# Altium schematic symbol library Resistor.SchLib: 1085 symbols (part 28 of 29)
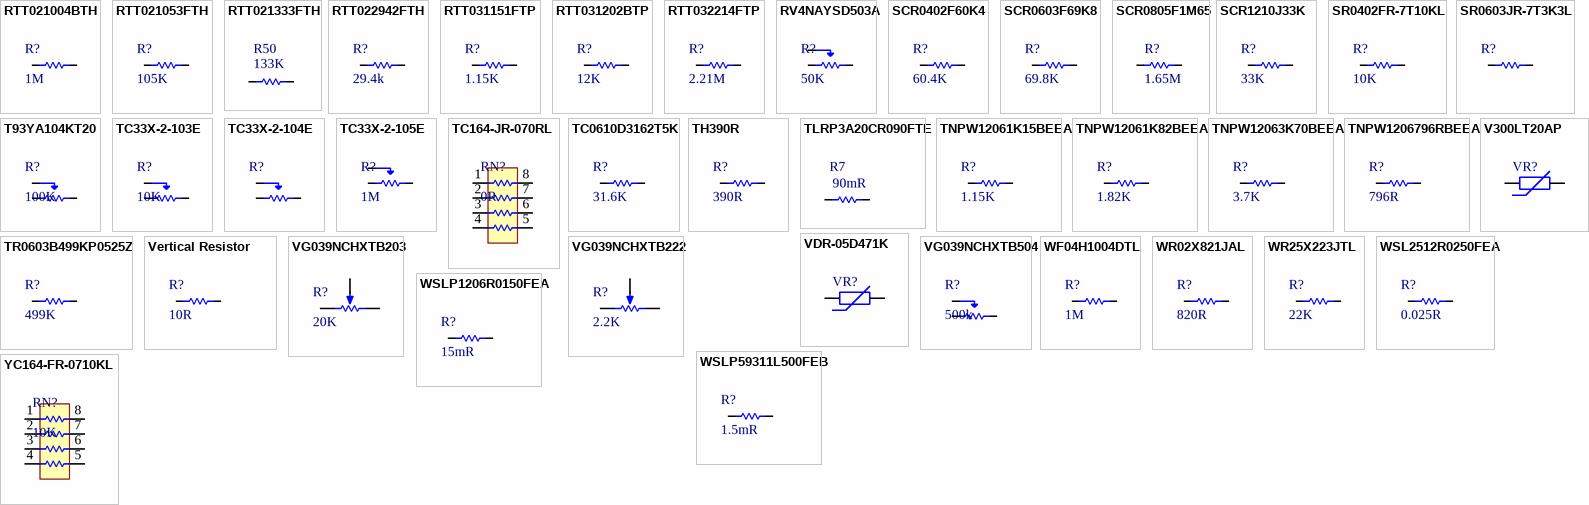
[diagram p54: symbols RTT021004BTH to YC164-FR-0710KL]

## RTT022942FTH
designator R?, comment 29.4k
62.5mW Thick Film Resistors 50V ±100ppm/℃ ±1% 29.4kΩ 0402 Chip Resistor - Surface Mount ROHS; Manufacturer: RALEC; Manufacturer Part Number: RTT022942FTH; Package: 0402; LCSC Part Number: C102950; Item Type: Resistor; ComponentLink1Description: LCSC; ComponentLink1URL: https://www.lcsc.com/product-detail/Chip-Resistor-Surface-Mount_RALEC-RTT022942FTH_C102950.html
footprint Res-0402
pins: 1, 2

## RTT031151FTP
designator R?, comment 1.15K
100mW Thick Film Resistors 75V ±100ppm/℃ ±1% 1.15kΩ 0603 Chip Resistor - Surface Mount ROHS; Manufacture Part Number: RTT031151FTP; Manufacturer: RALAC; Footprint: 0402; Value: 1.15K; ComponentLink1Description: JLC; ComponentLink1URL: https://jlcpcb.com/kr/partdetail/Ralec-RTT031151FTP/C103239; JLC Part Number: C103239; Item Type: Resistor
footprint Res-0402
pins: 1, 2

## RTT031202BTP
designator R?, comment 12K
12kΩ 0603 Chip Resistor - Surface Mount ROHS; Manufacturer: RALEC; Manufacturer Part Number: RTT031202BTP; Footprint: 0603; ComponentLink1Description: LCSC; ComponentLink1URL: https://lcsc.com/product-detail/Chip-span-style-background-color-ff0-Resistor-span-Surface-Mount_RALEC-RTT031202BTP_C2981490.html; LCSC Part Number: C2981490
footprint Res-0603
pins: 1, 2

## RTT032214FTP
designator R?, comment 2.21M
2.21MΩ ±1% 0.1W ±100ppm/℃ 0603 Chip Resistor - Surface Mount RoHS; Manufacturer: RALEC; Manufacturer Part Number: RTT032214FTP; Value: 2.21M; LCSC Part Number: C166858
footprint Res-0603
pins: 1, 2

## RV4NAYSD503A
designator R?, comment 50K
Potentiometer RV4 Series 1 Turn 50K Ohms 10% Tol Power 2W Slotted 0.875 In Shaft; Manufacturer: Precision Electronic Components; Manufacturer Part Number: RV4NAYSD503A; Value: 50kR; Number of Turns: 1; Voltage Rating (DC): 500V; Actuator Length: 0.875inch; Actuator Diameter: 0.249inch; Supplier: Digikey; Supplier Part Number: RV4N503C-ND; RoHS: Yes; Category: Variable Resistors and Potentiometers; Stock: 1093; Pricing: 1=18.17, 10=16.774, 25=16.0752, 50=13.9784, 100=12.5806, 250=10.83328, 500=10.4838, 1000=9.78488 (USD); Mounting Technology: Panel; Housing Material: Stainless Steel; Tolerance: 10%; Packaging: Bulk; Taper: Linear; Termination: Solder; Number of Gangs: 1; Resistor Type: Carbon; Package Quantity: 100; Max Power Dissipation: 2W; Series: RV4; Diameter: 28.4mm; Length: 13.6mm; Reach SVHC Compliant: Yes; Lead Free: Lead Free; ComponentLink1URL: https://datasheet.ciiva.com/2152/milstylerv4-2152739.pdf?src-supplier=Digikey; ComponentLink1Description: https://datasheet.ciiva.com/2152/milstylerv4-2152739.pdf?src-supplier=Digikey; Item Type: Potentiometer; Package: Custom
footprint RV4NAYSD503A
pins: 1, 2 CW, 3

## SCR0402F60K4
designator R?, comment 60.4K
60.4kΩ 50V 62.5mW Thick Film Resistors ±1% 0402 Chip Resistor - Surface Mount ROHS; Manufacturer: VO; Manufacturer Part Number: SCR0402F60K4; Package: 0402; LCSC Part Number: C3016055; Item Type: Resistor; ComponentLink1Description: LCSC; ComponentLink1URL: https://www.lcsc.com/product-detail/Chip-Resistor-Surface-Mount_VO-SCR0402F60K4_C3016055.html
footprint Res-0402
pins: 1, 2

## SCR0603F69K8
designator R?, comment 69.8K
100mW Thick Film Resistors 75V ±1% 69.8kΩ 0603 Chip Resistor - Surface Mount ROHS; Manufacturer: VO; Manufacturer Part Number: SCR0603F69K8; Package: 0603; LCSC Part Number: C3016381; Item Type: Resistor; ComponentLink1Description: LCSC; ComponentLink1URL: https://www.lcsc.com/product-detail/Chip-Resistor-Surface-Mount_VO-SCR0603F69K8_C3016381.html
footprint Res-0603
pins: 1, 2

## SCR0805F1M65
designator R?, comment 1.65M
125mW Thick Film Resistors 150V ±1% 1.65MΩ 0805 Chip Resistor - Surface Mount ROHS; Manufacturer: VO; Manufacturer Part Number: SCR0805F1M65; Package: 0805; LCSC Part Number: C3016615; Item Type: Resistor; ComponentLink1Description: LCSC; ComponentLink1URL: https://www.lcsc.com/product-detail/Chip-Resistor-Surface-Mount_VO-SCR0805F1M65_C3016615.html
footprint RES-0805 (SMD 0805)
pins: 1, 2

## SCR1210J33K
designator R?, comment 33K
RES 33K OHM ±5% 500mW Thick Film Resistors 200V 1210 Chip Resistor - Surface Mount ROHS; Manufacturer: VO; Manufacturer Part Number: SCR1210J33K; Package: 1210; LCSC Part Number: C3018222; Item Type: Resistor; ComponentLink1Description: LCSC; ComponentLink1URL: https://www.lcsc.com/product-detail/Chip-Resistor-Surface-Mount_VO-SCR1210J33K_C3018222.html
footprint Res_1210
pins: 1, 2

## SR0402FR-7T10KL
designator R?, comment 10K
RES 10K OHM 1% 1/5W 0402; Manufacturer: Yageo; Manufacturer Part Number: SR0402FR-7T10KL; Supplier 1: Digi-Key; Stock 1: 7859; Pricing 1: 1=0.56, 10=0.398, 100=0.2072, 1000=0.11156, 2500=0.10757, 5000=0.10598 (USD); RoHS Compliant: Yes; ComponentLink1URL: http://www.yageo.com/documents/recent/PYu-SR_D_F%20tol_RoHS_L_3.pdf?src-supplier=Digi-Key; ComponentLink1Description: http://www.yageo.com/documents/recent/PYu-SR_D_F%20tol_RoHS_L_3.pdf?src-supplier=Digi-Key; Supplier Part Number 1: YAG5815CT-ND; LCSC Part Number: C854480
footprint Res-0402
pins: 1, 2

## SR0603JR-7T3K3L
designator R?
250mW Thick Film Resistors 75V ±100ppm/℃ ±5% 3.3kΩ 0603 Chip Resistor - Surface Mount ROHS; Manufacturer: Yageo; Manufacturer Part Number: SR0603JR-7T3K3L; Supplier: Future Electronics; LCSC Part Number: C873727; RoHS: Yes; Item Type: Resistors; Stock: 10000; Pricing: 5000=0.0081, 15000=0.0078, 25000=0.0077, 100000=0.0074, 150000=0.0073 (USD); ComponentLink1Description: LCSC; ComponentLink1URL: https://www.lcsc.com/product-detail/Chip-Resistor-Surface-Mount_YAGEO-SR0603JR-7T3K3L_C873727.html
footprint Res-0603
pins: 1, 2

## T93YA104KT20
designator R?, comment 100K
TRIMMER 100K OHM 0.5W PC PIN TOP; Manufacturer: Vishay Sfernice; Manufacturer Part Number: T93YA104KT20; Item Type: Potensiometer; Value: 100kR; Tolerance: 10%; Power Rating: 500mW; Voltage Rating: 250V; Number of Turns: 21; Temperature Coefficient: 100ppm/°C; Supplier: Future Electronics; LCSC Part Number: C7061693; RoHS: Yes; Stock: 500; Pricing: 500=0.835, 1000=0.82, 1500=0.815, 2000=0.81, 2500=0.795 (USD); Mounting Technology: PCB,Through Hole; Min Operating Temperature: -55°C; Max Operating Temperature: 155°C; Packaging: Rail/Tube; Series: T93; Technology: CERMET; Package Quantity: 50; Resistor Type: Cermet; Taper: Linear; Termination: Pin; Max Power Dissipation: 500mW; Resistance Tolerance: 10%; Voltage Rating (AC): 250V; Length: 0.382inch; Width: 0.197inch; Height: 0.386inch; Depth: 5mm; Radiation Hardening: No; Lead Free: Lead Free; RoHS Compliant: Yes; Reach SVHC Compliant: Unknown; ComponentLink1URL: https://datasheet.ciiva.com/11831/0900766b80ed9ad6-11831453.pdf?src-supplier=Rs; ComponentLink1Description: https://datasheet.ciiva.com/11831/0900766b80ed9ad6-11831453.pdf?src-supplier=Rs; ComponentLink2URL: https://datasheet.ciiva.com/2156/t93-2156473.pdf?src-supplier=Digikey; ComponentLink2Description: https://datasheet.ciiva.com/2156/t93-2156473.pdf?src-supplier=Digikey; ComponentLink3URL: https://datasheet.ciiva.com/16367/t93-16367128.pdf?src-supplier=Future+Electronics; ComponentLink3Description: https://datasheet.ciiva.com/16367/t93-16367128.pdf?src-supplier=Future+Electronics
footprint T93YA104KT20
pins: 1 CCW, 2 Wiper, 3 CW

## TC33X-2-103E
designator R?, comment 10K
TRIMMER 10K OHM 0.1W J LEAD TOP; Manufacturer: Bourns; Manufacturer Part Number: TC33X-2-103E; Tolerance: 25%; Resistance: 10kR; Number of Turns: 1; Power Rating: 100mW; Temperature Coefficient: 250ppm/°C; Voltage Rating (DC): 50V; Item Type: Potentiometer; Supplier 1: Rs; RoHS: Yes; Category: Variable Resistors and Potentiometers; Stock 1: 950; Pricing 1: 500=0.24400, 1000=0.22000, 2000=0.19700, 4000=0.17300 (GBP); Mount: Surface Mount; Color: Silver; Weight: 29.4mg; Contact Plating: Copper,Tin,Silver; Min Operating Temperature: -40°C; Max Operating Temperature: 100°C; Packaging: Tape and Reel; Package Quantity: 1; Resistor Type: Cermet; Termination: Foot Print; Taper: Linear; Max Power Dissipation: 100mW; Series: TC33; Resistance Tolerance: 25%; Length: 3mm; Width: 0.118inch; Height: 0.047inch; Depth: 3.8mm; Radiation Hardening: No; Reach SVHC Compliant: Yes; Military Standard: Not; Lead Free: Lead Free; RoHS Compliant: Yes; ComponentLink1URL: https://datasheet.ciiva.com/11830/0900766b802749b3-11830705.pdf?src-supplier=Rs; ComponentLink1Description: https://datasheet.ciiva.com/11830/0900766b802749b3-11830705.pdf?src-supplier=Rs; ComponentLink2URL: https://datasheet.ciiva.com/7953/1818686-7953349.pdf?src-supplier=Element14; ComponentLink2Description: https://datasheet.ciiva.com/7953/1818686-7953349.pdf?src-supplier=Element14; ComponentLink3URL: https://datasheet.ciiva.com/26944/getdatasheetpartid-183773-26944166.pdf?src-supplier=Verical; ComponentLink3Description: https://datasheet.ciiva.com/26944/getdatasheetpartid-183773-26944166.pdf?src-supplier=Verical; ComponentLink4URL: https://datasheet.ciiva.com/2155/tc33-2155962.pdf?src-supplier=Digi-Key; ComponentLink4Description: https://datasheet.ciiva.com/2155/tc33-2155962.pdf?src-supplier=Digi-Key; ComponentLink5URL: https://datasheet.ciiva.com/2155/tc33-2155963.pdf?src-supplier=Digi-Key; ComponentLink5Description: https://datasheet.ciiva.com/2155/tc33-2155963.pdf?src-supplier=Digi-Key; ComponentLink6URL: https://datasheet.ciiva.com/2155/tc33-2155964.pdf?src-supplier=Digi-Key; ComponentLink6Description: https://datasheet.ciiva.com/2155/tc33-2155964.pdf?src-supplier=Digi-Key; ComponentLink7URL: https://datasheet.ciiva.com/8089/tc33-8089484.pdf?src-supplier=Avnet; ComponentLink7Description: https://datasheet.ciiva.com/8089/tc33-8089484.pdf?src-supplier=Avnet; ComponentLink8URL: https://datasheet.ciiva.com/28659/1520225-28659212.pdf?src-supplier=Element14; ComponentLink8Description: https://datasheet.ciiva.com/28659/1520225-28659212.pdf?src-supplier=Element14; Supplier Part Number 1: 4617135P; LCSC part Number: C719176
footprint TC33X-2-103E_
pins: 1 CCW, 2 Wiper, 3 CW

## TC33X-2-104E
designator R?
TRIMMER 100K OHM 0.1W J LEAD TOP; Manufacturer: Bourns; Manufacturer Part Number: TC33X-2-104E; Resistance: 100kR; Tolerance: 25%; Power Rating: 100mW; Number of Turns: 1; Temperature Coefficient: 250ppm/°C; Voltage Rating (DC): 50V; Item Type: Potentiometer; Supplier 1: Arrow Electronics; RoHS: Yes; Category: Variable Resistors and Potentiometers; Stock 1: 12500; Pricing 1: 2500=0.15500, 5000=0.13130 (USD); Mount: Surface Mount; Color: Silver; Weight: 29.4mg; Min Operating Temperature: -40°C; Max Operating Temperature: 100°C; Packaging: Tape and Reel; Package Quantity: 2500; Resistor Type: Carbon,Cermet; Termination: Foot Print; Max Power Dissipation: 100mW; Series: TC33; Resistance Tolerance: 25%; Length: 3mm; Width: 0.118inch; Height: 0.047inch; Depth: 3.8mm; Radiation Hardening: No; REACH SVHC: No SVHC; Military Standard: Not; RoHS Compliant: Yes; ComponentLink1URL: https://datasheet.ciiva.com/11832/0900766b802749b3-11832506.pdf?src-supplier=RSComponents; ComponentLink1Description: https://datasheet.ciiva.com/11832/0900766b802749b3-11832506.pdf?src-supplier=RSComponents; ComponentLink2URL: https://datasheet.ciiva.com/8700/tc33-8700395.pdf?src-supplier=Avnet; ComponentLink2Description: https://datasheet.ciiva.com/8700/tc33-8700395.pdf?src-supplier=Avnet; ComponentLink3URL: https://datasheet.ciiva.com/2155/tc33-2155965.pdf?src-supplier=Digi-Key; ComponentLink3Description: https://datasheet.ciiva.com/2155/tc33-2155965.pdf?src-supplier=Digi-Key; ComponentLink4URL: https://datasheet.ciiva.com/7953/1818686-7953181.pdf?src-supplier=Element14; ComponentLink4Description: https://datasheet.ciiva.com/7953/1818686-7953181.pdf?src-supplier=Element14; ComponentLink5URL: https://datasheet.ciiva.com/16716/70155234-16716301.pdf?src-supplier=Allied+Electronics; ComponentLink5Description: https://datasheet.ciiva.com/16716/70155234-16716301.pdf?src-supplier=Allied+Electronics; ComponentLink6URL: https://datasheet.ciiva.com/2155/tc33-2155966.pdf?src-supplier=Digi-Key; ComponentLink6Description: https://datasheet.ciiva.com/2155/tc33-2155966.pdf?src-supplier=Digi-Key; ComponentLink7URL: https://datasheet.ciiva.com/7953/1818686-7953182.pdf?src-supplier=Element14; ComponentLink7Description: https://datasheet.ciiva.com/7953/1818686-7953182.pdf?src-supplier=Element14; ComponentLink8URL: https://datasheet.ciiva.com/2155/tc33-2155967.pdf?src-supplier=Digi-Key; ComponentLink8Description: https://datasheet.ciiva.com/2155/tc33-2155967.pdf?src-supplier=Digi-Key; Supplier Part Number 1: TC33X-2-104E; LCSC Part Number: C719186
footprint TC33X-2-104E_
pins: 1 CCW, 2 Wiper, 3 CW

## TC33X-2-105E
designator R?, comment 1M
TRIMMER 1M OHM 0.1W J LEAD TOP; Manufacturer: Bourns; Manufacturer Part Number: TC33X-2-105E; Item Type: Variable Resistor; Supplier: Arrow Electronics; Supplier Part Number: TC33X-2-105E; RoHS: Yes; Category: Variable Resistors and Potentiometers; Stock: 5461; Pricing: 1=0.2738, 10=0.235, 25=0.2264, 100=0.2108, 250=0.2012, 500=0.1814, 1000=0.1356, 3000=0.126 (USD); ComponentLink1URL: https://datasheet.ciiva.com/6227/tc33-6227126.pdf?src-supplier=Digi-Key; ComponentLink1Description: https://datasheet.ciiva.com/6227/tc33-6227126.pdf?src-supplier=Digi-Key; ComponentLink2URL: https://datasheet.ciiva.com/43453/306tc33-43453797.pdf?src-supplier=Onlinecomponents.com; ComponentLink2Description: https://datasheet.ciiva.com/43453/306tc33-43453797.pdf?src-supplier=Onlinecomponents.com; LCSC Part Number: C5362465
footprint TC33X-2-105E
pins: 1 CCW, 2 Wiper, 3 CW

## TC164-JR-070RL
designator RN?, comment 0R
RES ARRAY 4 RES ZERO OHM 1206; Manufacturer: YAGEO; Manufacturer Part Number: TC164-JR-070RL; Item Type: Resistor; Package: 0603x4; LCSC Part Number: C1731008; ComponentLink1Description: LCSC; ComponentLink1URL: https://www.lcsc.com/product-detail/Resistor-Networks-Arrays_YAGEO-TC164-JR-070RL_C1731008.html
footprint 0603x4
pins: 1, 2, 3, 4, 5, 6, 7, 8

## TC0610D3162T5K
designator R?, comment 31.6K
333mW Thin Film Resistor 200V ±0.5% ±10ppm/℃ 31.6kΩ 1206 Chip Resistor - Surface Mount ROHS; Manufacturer: Uniroyal; Manufacturer Part Number: TC0610D3162T5K; Package: 1206; LCSC Part Number: C517800; Item Type: Resistor; ComponentLink1Description: LCSC; ComponentLink1URL: https://www.lcsc.com/product-detail/C517800.html
footprint Res-1206
pins: 1, 2

## TH390R
designator R?, comment 390R
Safety Resistor 390Ω 500mW ±350ppm/℃ ±5% Plugin Through Hole Resistors ROHS; Manufacturer: VO; Manufacturer Part Number: FR1/2W-390Ω±5%-2T52; Package: Plugin; LCSC Part Number: C601800; Item Type: Through Hole Resistor; ComponentLink1Description: LCSC; ComponentLink1URL: https://www.lcsc.com/product-detail/Through-Hole-Resistors_VO-FR1-2W-390-5-2T52_C601800.html
footprint TH390R
pins: 1, 2

## TLRP3A20CR090FTE
designator R7, comment 90mR
Res Current Sense Metal Strip 2512 0.09 Ohm 1% 2W ±25ppm/°C Molded Emboss T/R; Manufacturer: CGS; Manufacturer Part Number: TLRP3A20CR090FTE; Supplier: Digikey; Supplier Part Number: 1712-TLRP3A20CR090FTECT-ND; RoHS: No; Category: Chip SMD Resistors; Stock: 11268; Pricing: 1=0.57, 10=0.453, 25=0.4096, 50=0.3686, 100=0.3045, 250=0.28672, 500=0.23212, 1000=0.18775 (USD); Packaging: 10Packaging; Power Rating: 2W
footprint RES-2512
pins: 1, 2

## TNPW12061K15BEEA
designator R?, comment 1.15K
RES 1.15K OHM 0.1% 0.52W 1206; Manufacturer: Vishay; Manufacturer Part Number: TNPW12061K15BEEA; Item Type: Resistors; Max Power Dissipation: 250mW; Value: 1.15kΩ; Temperature Coefficient: 25ppm/°C; Voltage Rating: 200V; Supplier: DigiKey; LCSC Part Number: C1712792; RoHS: Compliant; Stock: 4975; Pricing: 1=0.41, 10=0.344, 25=0.3192, 50=0.3014, 100=0.2851, 250=0.2654, 500=0.25204, 1000=0.24 (USD); Case/Package: 1206; Case Code (Imperial): 1206; Case Code (Metric): 3216; China RoHS: Compliant; Composition: Thin Film; Contact Plating: Tin; Features: Anti-Sulfur, Automotive AEC-Q200, Moisture Resistant; Height: 550µm; Lead Free: Lead Free; Length: 3.2004mm; Lifecycle Status: Production; Max Operating Temperature: 125°C; Min Operating Temperature: -55°C; Mounting Technology: Surface Mount; Number of Terminals: 2; Number of Terminations: 2; Power Dissipation: 250mW; Power Rating: 250mW; Radiation Hardening: No; REACH SVHC: Yes; Termination: SMD/SMT; Tolerance: 0.1%; Width: 1.6mm; Working Voltage: 200V; ComponentLink1URL: https://datasheet.octopart.com:443/TNPW12061K15BEEA-Vishay-datasheet-182188515.pdf?src-supplier=IHS; ComponentLink1Description: https://datasheet.octopart.com:443/TNPW12061K15BEEA-Vishay-datasheet-182188515.pdf?src-supplier=IHS; ComponentLink2URL: https://datasheet.octopart.com:443/TNPW12061K15BEEA-Vishay-Dale-datasheet-182026744.pdf?src-supplier=IHS; ComponentLink2Description: https://datasheet.octopart.com:443/TNPW12061K15BEEA-Vishay-Dale-datasheet-182026744.pdf?src-supplier=IHS; ComponentLink3URL: https://datasheet.octopart.com/TNPW12061K15BEEA-Vishay-datasheet-13498837.pdf; ComponentLink3Description: https://datasheet.octopart.com/TNPW12061K15BEEA-Vishay-datasheet-13498837.pdf; ComponentLink4URL: https://datasheet.octopart.com/TNPW12061K15BEEA-Vishay-datasheet-13414878.pdf; ComponentLink4Description: https://datasheet.octopart.com/TNPW12061K15BEEA-Vishay-datasheet-13414878.pdf; ComponentLink5URL: https://datasheet.octopart.com/TNPW12061K15BEEA-Vishay-datasheet-13295955.pdf; ComponentLink5Description: https://datasheet.octopart.com/TNPW12061K15BEEA-Vishay-datasheet-13295955.pdf; ComponentLink6URL: https://datasheet.octopart.com/TNPW12061K15BEEA-Vishay-datasheet-13196373.pdf; ComponentLink6Description: https://datasheet.octopart.com/TNPW12061K15BEEA-Vishay-datasheet-13196373.pdf; ComponentLink7URL: https://datasheet.octopart.com/TNPW12061K15BEEA-Vishay-datasheet-13143890.pdf; ComponentLink7Description: https://datasheet.octopart.com/TNPW12061K15BEEA-Vishay-datasheet-13143890.pdf; ComponentLink8URL: https://datasheet.octopart.com/TNPW12061K15BEEA-Vishay-datasheet-13081780.pdf; ComponentLink8Description: https://datasheet.octopart.com/TNPW12061K15BEEA-Vishay-datasheet-13081780.pdf; ComponentLink9URL: https://datasheet.octopart.com/TNPW12061K15BEEA-Vishay-datasheet-13052401.pdf; ComponentLink9Description: https://datasheet.octopart.com/TNPW12061K15BEEA-Vishay-datasheet-13052401.pdf; ComponentLink10URL: https://datasheet.octopart.com/TNPW12061K15BEEA-Vishay-datasheet-13034137.pdf; ComponentLink10Description: https://datasheet.octopart.com/TNPW12061K15BEEA-Vishay-datasheet-13034137.pdf; ComponentLink11URL: https://datasheet.octopart.com/TNPW12061K15BEEA-Vishay-datasheet-12585086.pdf; ComponentLink11Description: https://datasheet.octopart.com/TNPW12061K15BEEA-Vishay-datasheet-12585086.pdf; ComponentLink12URL: https://datasheet.octopart.com/TNPW12061K15BEEA-Vishay-datasheet-12543131.pdf; ComponentLink12Description: https://datasheet.octopart.com/TNPW12061K15BEEA-Vishay-datasheet-12543131.pdf; ComponentLink13URL: https://datasheet.octopart.com/TNPW12061K15BEEA-Vishay-datasheet-12532511.pdf; ComponentLink13Description: https://datasheet.octopart.com/TNPW12061K15BEEA-Vishay-datasheet-12532511.pdf; ComponentLink14URL: https://datasheet.octopart.com/TNPW12061K15BEEA-Vishay-datasheet-12519971.pdf; ComponentLink14Description: https://datasheet.octopart.com/TNPW12061K15BEEA-Vishay-datasheet-12519971.pdf; ComponentLink15URL: https://datasheet.octopart.com/TNPW12061K15BEEA-Vishay-datasheet-12509767.pdf; ComponentLink15Description: https://datasheet.octopart.com/TNPW12061K15BEEA-Vishay-datasheet-12509767.pdf; ComponentLink16URL: https://datasheet.octopart.com/TNPW12061K15BEEA-Vishay-datasheet-12365287.pdf; ComponentLink16Description: https://datasheet.octopart.com/TNPW12061K15BEEA-Vishay-datasheet-12365287.pdf; ComponentLink17URL: https://datasheet.octopart.com/TNPW12061K15BEEA-Vishay-datasheet-10854096.pdf; ComponentLink17Description: https://datasheet.octopart.com/TNPW12061K15BEEA-Vishay-datasheet-10854096.pdf; ComponentLink18URL: https://datasheet.octopart.com/TNPW12061K15BEEA-Vishay-datasheet-10678752.pdf; ComponentLink18Description: https://datasheet.octopart.com/TNPW12061K15BEEA-Vishay-datasheet-10678752.pdf; ComponentLink19URL: https://datasheet.octopart.com/TNPW12061K15BEEA-Vishay-datasheet-10283461.pdf; ComponentLink19Description: https://datasheet.octopart.com/TNPW12061K15BEEA-Vishay-datasheet-10283461.pdf; ComponentLink20URL: https://datasheet.octopart.com/TNPW12061K15BEEA-Vishay-datasheet-10185418.pdf; ComponentLink20Description: https://datasheet.octopart.com/TNPW12061K15BEEA-Vishay-datasheet-10185418.pdf; ComponentLink21URL: https://datasheet.octopart.com/TNPW12061K15BEEA-Vishay-datasheet-10055244.pdf; ComponentLink21Description: https://datasheet.octopart.com/TNPW12061K15BEEA-Vishay-datasheet-10055244.pdf; ComponentLink22URL: http://sigma.octopart.com:80/rohs_statement/Vishay-company-15.pdf?src-supplier=Compliance+Statements; ComponentLink22Description: http://sigma.octopart.com:80/rohs_statement/Vishay-company-15.pdf?src-supplier=Compliance+Statements
footprint Res-1206
pins: 1, 2

## TNPW12061K82BEEA
designator R?, comment 1.82K
RES 1.82K OHM 0.1% 0.52W 1206; Manufacturer: Vishay; Manufacturer Part Number: TNPW12061K82BEEA; Item Type: Resistors; Max Power Dissipation: 250mW; Value: 1.82kΩ; Temperature Coefficient: 25ppm/°C; Voltage Rating: 200V; Supplier: DigiKey; LCSC Part Number: C2093281; RoHS: Compliant; Pricing: 5000=0.1931 (USD); Case/Package: 1206; Case Code (Imperial): 1206; Case Code (Metric): 3216; China RoHS: Compliant; Composition: Thin Film; Contact Plating: Tin; Features: Anti-Sulfur, Automotive AEC-Q200, Moisture Resistant; Height: 550µm; Length: 3.2004mm; Lifecycle Status: Production; Max Operating Temperature: 125°C; Min Operating Temperature: -55°C; Mounting Technology: Surface Mount; Number of Terminals: 2; Number of Terminations: 2; Power Dissipation: 250mW; Power Rating: 250mW; Radiation Hardening: No; REACH SVHC: Yes; Termination: SMD/SMT; Tolerance: 0.1%; Weight: 16.187578mg; Width: 1.6mm; Working Voltage: 200V; ComponentLink1URL: https://datasheet.octopart.com:443/TNPW12061K82BEEA-Vishay-datasheet-182188515.pdf?src-supplier=IHS; ComponentLink1Description: https://datasheet.octopart.com:443/TNPW12061K82BEEA-Vishay-datasheet-182188515.pdf?src-supplier=IHS; ComponentLink2URL: https://datasheet.octopart.com:443/TNPW12061K82BEEA-Vishay-Dale-datasheet-182026744.pdf?src-supplier=IHS; ComponentLink2Description: https://datasheet.octopart.com:443/TNPW12061K82BEEA-Vishay-Dale-datasheet-182026744.pdf?src-supplier=IHS; ComponentLink3URL: https://datasheet.octopart.com/TNPW12061K82BEEA-Vishay-datasheet-13498837.pdf; ComponentLink3Description: https://datasheet.octopart.com/TNPW12061K82BEEA-Vishay-datasheet-13498837.pdf; ComponentLink4URL: https://datasheet.octopart.com/TNPW12061K82BEEA-Vishay-datasheet-13414878.pdf; ComponentLink4Description: https://datasheet.octopart.com/TNPW12061K82BEEA-Vishay-datasheet-13414878.pdf; ComponentLink5URL: https://datasheet.octopart.com/TNPW12061K82BEEA-Vishay-datasheet-13295955.pdf; ComponentLink5Description: https://datasheet.octopart.com/TNPW12061K82BEEA-Vishay-datasheet-13295955.pdf; ComponentLink6URL: https://datasheet.octopart.com/TNPW12061K82BEEA-Vishay-datasheet-13196373.pdf; ComponentLink6Description: https://datasheet.octopart.com/TNPW12061K82BEEA-Vishay-datasheet-13196373.pdf; ComponentLink7URL: https://datasheet.octopart.com/TNPW12061K82BEEA-Vishay-datasheet-13143890.pdf; ComponentLink7Description: https://datasheet.octopart.com/TNPW12061K82BEEA-Vishay-datasheet-13143890.pdf; ComponentLink8URL: https://datasheet.octopart.com/TNPW12061K82BEEA-Vishay-datasheet-13081780.pdf; ComponentLink8Description: https://datasheet.octopart.com/TNPW12061K82BEEA-Vishay-datasheet-13081780.pdf; ComponentLink9URL: https://datasheet.octopart.com/TNPW12061K82BEEA-Vishay-datasheet-13052401.pdf; ComponentLink9Description: https://datasheet.octopart.com/TNPW12061K82BEEA-Vishay-datasheet-13052401.pdf; ComponentLink10URL: https://datasheet.octopart.com/TNPW12061K82BEEA-Vishay-datasheet-13034137.pdf; ComponentLink10Description: https://datasheet.octopart.com/TNPW12061K82BEEA-Vishay-datasheet-13034137.pdf; ComponentLink11URL: https://datasheet.octopart.com/TNPW12061K82BEEA-Vishay-datasheet-12585086.pdf; ComponentLink11Description: https://datasheet.octopart.com/TNPW12061K82BEEA-Vishay-datasheet-12585086.pdf; ComponentLink12URL: https://datasheet.octopart.com/TNPW12061K82BEEA-Vishay-datasheet-12543131.pdf; ComponentLink12Description: https://datasheet.octopart.com/TNPW12061K82BEEA-Vishay-datasheet-12543131.pdf; ComponentLink13URL: https://datasheet.octopart.com/TNPW12061K82BEEA-Vishay-datasheet-12532511.pdf; ComponentLink13Description: https://datasheet.octopart.com/TNPW12061K82BEEA-Vishay-datasheet-12532511.pdf; ComponentLink14URL: https://datasheet.octopart.com/TNPW12061K82BEEA-Vishay-datasheet-12519971.pdf; ComponentLink14Description: https://datasheet.octopart.com/TNPW12061K82BEEA-Vishay-datasheet-12519971.pdf; ComponentLink15URL: https://datasheet.octopart.com/TNPW12061K82BEEA-Vishay-datasheet-12509767.pdf; ComponentLink15Description: https://datasheet.octopart.com/TNPW12061K82BEEA-Vishay-datasheet-12509767.pdf; ComponentLink16URL: https://datasheet.octopart.com/TNPW12061K82BEEA-Vishay-datasheet-12365287.pdf; ComponentLink16Description: https://datasheet.octopart.com/TNPW12061K82BEEA-Vishay-datasheet-12365287.pdf; ComponentLink17URL: https://datasheet.octopart.com/TNPW12061K82BEEA-Vishay-datasheet-10854096.pdf; ComponentLink17Description: https://datasheet.octopart.com/TNPW12061K82BEEA-Vishay-datasheet-10854096.pdf; ComponentLink18URL: https://datasheet.octopart.com/TNPW12061K82BEEA-Vishay-datasheet-10678752.pdf; ComponentLink18Description: https://datasheet.octopart.com/TNPW12061K82BEEA-Vishay-datasheet-10678752.pdf; ComponentLink19URL: https://datasheet.octopart.com/TNPW12061K82BEEA-Vishay-datasheet-10283461.pdf; ComponentLink19Description: https://datasheet.octopart.com/TNPW12061K82BEEA-Vishay-datasheet-10283461.pdf; ComponentLink20URL: https://datasheet.octopart.com/TNPW12061K82BEEA-Vishay-datasheet-10185418.pdf; ComponentLink20Description: https://datasheet.octopart.com/TNPW12061K82BEEA-Vishay-datasheet-10185418.pdf; ComponentLink21URL: https://datasheet.octopart.com/TNPW12061K82BEEA-Vishay-datasheet-10055244.pdf; ComponentLink21Description: https://datasheet.octopart.com/TNPW12061K82BEEA-Vishay-datasheet-10055244.pdf; ComponentLink22URL: http://sigma.octopart.com:80/rohs_statement/Vishay-company-15.pdf?src-supplier=Compliance+Statements; ComponentLink22Description: http://sigma.octopart.com:80/rohs_statement/Vishay-company-15.pdf?src-supplier=Compliance+Statements
footprint Res-1206
pins: 1, 2

## TNPW12063K70BEEA
designator R?, comment 3.7K
RES 3.7K OHM 0.1% 0.52W 1206; Manufacturer: Vishay; Manufacturer Part Number: TNPW12063K70BEEA; Item Type: Resistors; Max Power Dissipation: 250mW; Value: 3.7kΩ; Temperature Coefficient: 25ppm/°C; Voltage Rating: 200V; Supplier: DigiKey; LCSC Part Number: C1714117; RoHS: Compliant; Pricing: 5000=0.1931 (USD); Case/Package: 1206; Case Code (Imperial): 1206; Case Code (Metric): 3216; China RoHS: Compliant; Composition: Thin Film; Contact Plating: Tin; Features: Anti-Sulfur, Automotive AEC-Q200, Moisture Resistant; Height: 550µm; Length: 3.2004mm; Lifecycle Status: Production; Max Operating Temperature: 125°C; Min Operating Temperature: -55°C; Mounting Technology: Surface Mount; Number of Terminals: 2; Number of Terminations: 2; Power Dissipation: 250mW; Power Rating: 250mW; Radiation Hardening: No; REACH SVHC: Yes; Termination: SMD/SMT; Tolerance: 0.1%; Width: 1.6mm; Working Voltage: 200V; ComponentLink1URL: https://datasheet.octopart.com:443/TNPW12063K70BEEA-Vishay-datasheet-182188515.pdf?src-supplier=IHS; ComponentLink1Description: https://datasheet.octopart.com:443/TNPW12063K70BEEA-Vishay-datasheet-182188515.pdf?src-supplier=IHS; ComponentLink2URL: https://datasheet.octopart.com:443/TNPW12063K70BEEA-Vishay-Dale-datasheet-182026744.pdf?src-supplier=IHS; ComponentLink2Description: https://datasheet.octopart.com:443/TNPW12063K70BEEA-Vishay-Dale-datasheet-182026744.pdf?src-supplier=IHS; ComponentLink3URL: https://datasheet.octopart.com:443/TNPW12063K70BEEA-Vishay-datasheet-79783896.pdf?src-supplier=Upverter; ComponentLink3Description: https://datasheet.octopart.com:443/TNPW12063K70BEEA-Vishay-datasheet-79783896.pdf?src-supplier=Upverter; ComponentLink4URL: https://datasheet.octopart.com/TNPW12063K70BEEA-Vishay-datasheet-13498837.pdf; ComponentLink4Description: https://datasheet.octopart.com/TNPW12063K70BEEA-Vishay-datasheet-13498837.pdf; ComponentLink5URL: https://datasheet.octopart.com/TNPW12063K70BEEA-Vishay-datasheet-13414878.pdf; ComponentLink5Description: https://datasheet.octopart.com/TNPW12063K70BEEA-Vishay-datasheet-13414878.pdf; ComponentLink6URL: https://datasheet.octopart.com/TNPW12063K70BEEA-Vishay-datasheet-13295955.pdf; ComponentLink6Description: https://datasheet.octopart.com/TNPW12063K70BEEA-Vishay-datasheet-13295955.pdf; ComponentLink7URL: https://datasheet.octopart.com/TNPW12063K70BEEA-Vishay-datasheet-13196373.pdf; ComponentLink7Description: https://datasheet.octopart.com/TNPW12063K70BEEA-Vishay-datasheet-13196373.pdf; ComponentLink8URL: https://datasheet.octopart.com/TNPW12063K70BEEA-Vishay-datasheet-13143890.pdf; ComponentLink8Description: https://datasheet.octopart.com/TNPW12063K70BEEA-Vishay-datasheet-13143890.pdf; ComponentLink9URL: https://datasheet.octopart.com/TNPW12063K70BEEA-Vishay-datasheet-13081780.pdf; ComponentLink9Description: https://datasheet.octopart.com/TNPW12063K70BEEA-Vishay-datasheet-13081780.pdf; ComponentLink10URL: https://datasheet.octopart.com/TNPW12063K70BEEA-Vishay-datasheet-13052401.pdf; ComponentLink10Description: https://datasheet.octopart.com/TNPW12063K70BEEA-Vishay-datasheet-13052401.pdf; ComponentLink11URL: https://datasheet.octopart.com/TNPW12063K70BEEA-Vishay-datasheet-13034137.pdf; ComponentLink11Description: https://datasheet.octopart.com/TNPW12063K70BEEA-Vishay-datasheet-13034137.pdf; ComponentLink12URL: https://datasheet.octopart.com/TNPW12063K70BEEA-Vishay-datasheet-12585086.pdf; ComponentLink12Description: https://datasheet.octopart.com/TNPW12063K70BEEA-Vishay-datasheet-12585086.pdf; ComponentLink13URL: https://datasheet.octopart.com/TNPW12063K70BEEA-Vishay-datasheet-12543131.pdf; ComponentLink13Description: https://datasheet.octopart.com/TNPW12063K70BEEA-Vishay-datasheet-12543131.pdf; ComponentLink14URL: https://datasheet.octopart.com/TNPW12063K70BEEA-Vishay-datasheet-12532511.pdf; ComponentLink14Description: https://datasheet.octopart.com/TNPW12063K70BEEA-Vishay-datasheet-12532511.pdf; ComponentLink15URL: https://datasheet.octopart.com/TNPW12063K70BEEA-Vishay-datasheet-12519971.pdf; ComponentLink15Description: https://datasheet.octopart.com/TNPW12063K70BEEA-Vishay-datasheet-12519971.pdf; ComponentLink16URL: https://datasheet.octopart.com/TNPW12063K70BEEA-Vishay-datasheet-12509767.pdf; ComponentLink16Description: https://datasheet.octopart.com/TNPW12063K70BEEA-Vishay-datasheet-12509767.pdf; ComponentLink17URL: https://datasheet.octopart.com/TNPW12063K70BEEA-Vishay-datasheet-12365287.pdf; ComponentLink17Description: https://datasheet.octopart.com/TNPW12063K70BEEA-Vishay-datasheet-12365287.pdf; ComponentLink18URL: https://datasheet.octopart.com/TNPW12063K70BEEA-Vishay-datasheet-10854096.pdf; ComponentLink18Description: https://datasheet.octopart.com/TNPW12063K70BEEA-Vishay-datasheet-10854096.pdf; ComponentLink19URL: https://datasheet.octopart.com/TNPW12063K70BEEA-Vishay-datasheet-10678752.pdf; ComponentLink19Description: https://datasheet.octopart.com/TNPW12063K70BEEA-Vishay-datasheet-10678752.pdf; ComponentLink20URL: https://datasheet.octopart.com/TNPW12063K70BEEA-Vishay-datasheet-10283461.pdf; ComponentLink20Description: https://datasheet.octopart.com/TNPW12063K70BEEA-Vishay-datasheet-10283461.pdf; ComponentLink21URL: https://datasheet.octopart.com/TNPW12063K70BEEA-Vishay-datasheet-10185418.pdf; ComponentLink21Description: https://datasheet.octopart.com/TNPW12063K70BEEA-Vishay-datasheet-10185418.pdf; ComponentLink22URL: https://datasheet.octopart.com/TNPW12063K70BEEA-Vishay-datasheet-10055244.pdf; ComponentLink22Description: https://datasheet.octopart.com/TNPW12063K70BEEA-Vishay-datasheet-10055244.pdf; ComponentLink23URL: http://sigma.octopart.com:80/rohs_statement/Vishay-company-15.pdf?src-supplier=Compliance+Statements; ComponentLink23Description: http://sigma.octopart.com:80/rohs_statement/Vishay-company-15.pdf?src-supplier=Compliance+Statements
footprint Res-1206
pins: 1, 2

## TNPW1206796RBEEA
designator R?, comment 796R
RES 796 OHM 0.1% 0.52W 1206; Manufacturer: Vishay; Manufacturer Part Number: TNPW1206796RBEEA; Item Type: Resistors; Max Power Dissipation: 250mW; Value: 796Ω; Temperature Coefficient: 25ppm/°C; Working Voltage: 200V; Supplier: DigiKey; LCSC Part Number: C1712588; RoHS: Compliant; Pricing: 5000=0.1931 (USD); Case/Package: 1206; China RoHS: Compliant; Composition: Thin Film; Contact Plating: Tin; Features: Anti-Sulfur, Automotive AEC-Q200, Moisture Resistant; Height: 550µm; Length: 3.2004mm; Lifecycle Status: Production; Max Operating Temperature: 125°C; Min Operating Temperature: -55°C; Mounting Technology: Surface Mount; Number of Terminals: 2; Number of Terminations: 2; Packaging: Tape & Reel; Power Dissipation: 250mW; Power Rating: 250mW; Radiation Hardening: No; REACH SVHC: Yes; Tolerance: 0.1%; Width: 1.6mm; ComponentLink1URL: https://datasheet.octopart.com:443/TNPW1206796RBEEA-Vishay-datasheet-182188515.pdf?src-supplier=IHS; ComponentLink1Description: https://datasheet.octopart.com:443/TNPW1206796RBEEA-Vishay-datasheet-182188515.pdf?src-supplier=IHS; ComponentLink2URL: https://datasheet.octopart.com:443/TNPW1206796RBEEA-Vishay-Dale-datasheet-182026744.pdf?src-supplier=IHS; ComponentLink2Description: https://datasheet.octopart.com:443/TNPW1206796RBEEA-Vishay-Dale-datasheet-182026744.pdf?src-supplier=IHS; ComponentLink3URL: https://datasheet.octopart.com/TNPW1206796RBEEA-Vishay-datasheet-13498837.pdf; ComponentLink3Description: https://datasheet.octopart.com/TNPW1206796RBEEA-Vishay-datasheet-13498837.pdf; ComponentLink4URL: https://datasheet.octopart.com/TNPW1206796RBEEA-Vishay-datasheet-13414878.pdf; ComponentLink4Description: https://datasheet.octopart.com/TNPW1206796RBEEA-Vishay-datasheet-13414878.pdf; ComponentLink5URL: https://datasheet.octopart.com/TNPW1206796RBEEA-Vishay-datasheet-13295955.pdf; ComponentLink5Description: https://datasheet.octopart.com/TNPW1206796RBEEA-Vishay-datasheet-13295955.pdf; ComponentLink6URL: https://datasheet.octopart.com/TNPW1206796RBEEA-Vishay-datasheet-13196373.pdf; ComponentLink6Description: https://datasheet.octopart.com/TNPW1206796RBEEA-Vishay-datasheet-13196373.pdf; ComponentLink7URL: https://datasheet.octopart.com/TNPW1206796RBEEA-Vishay-datasheet-13143890.pdf; ComponentLink7Description: https://datasheet.octopart.com/TNPW1206796RBEEA-Vishay-datasheet-13143890.pdf; ComponentLink8URL: https://datasheet.octopart.com/TNPW1206796RBEEA-Vishay-datasheet-13081780.pdf; ComponentLink8Description: https://datasheet.octopart.com/TNPW1206796RBEEA-Vishay-datasheet-13081780.pdf; ComponentLink9URL: https://datasheet.octopart.com/TNPW1206796RBEEA-Vishay-datasheet-13052401.pdf; ComponentLink9Description: https://datasheet.octopart.com/TNPW1206796RBEEA-Vishay-datasheet-13052401.pdf; ComponentLink10URL: https://datasheet.octopart.com/TNPW1206796RBEEA-Vishay-datasheet-13034137.pdf; ComponentLink10Description: https://datasheet.octopart.com/TNPW1206796RBEEA-Vishay-datasheet-13034137.pdf; ComponentLink11URL: https://datasheet.octopart.com/TNPW1206796RBEEA-Vishay-datasheet-12585086.pdf; ComponentLink11Description: https://datasheet.octopart.com/TNPW1206796RBEEA-Vishay-datasheet-12585086.pdf; ComponentLink12URL: https://datasheet.octopart.com/TNPW1206796RBEEA-Vishay-datasheet-12543131.pdf; ComponentLink12Description: https://datasheet.octopart.com/TNPW1206796RBEEA-Vishay-datasheet-12543131.pdf; ComponentLink13URL: https://datasheet.octopart.com/TNPW1206796RBEEA-Vishay-datasheet-12532511.pdf; ComponentLink13Description: https://datasheet.octopart.com/TNPW1206796RBEEA-Vishay-datasheet-12532511.pdf; ComponentLink14URL: https://datasheet.octopart.com/TNPW1206796RBEEA-Vishay-datasheet-12519971.pdf; ComponentLink14Description: https://datasheet.octopart.com/TNPW1206796RBEEA-Vishay-datasheet-12519971.pdf; ComponentLink15URL: https://datasheet.octopart.com/TNPW1206796RBEEA-Vishay-datasheet-12509767.pdf; ComponentLink15Description: https://datasheet.octopart.com/TNPW1206796RBEEA-Vishay-datasheet-12509767.pdf; ComponentLink16URL: https://datasheet.octopart.com/TNPW1206796RBEEA-Vishay-datasheet-12365287.pdf; ComponentLink16Description: https://datasheet.octopart.com/TNPW1206796RBEEA-Vishay-datasheet-12365287.pdf; ComponentLink17URL: https://datasheet.octopart.com/TNPW1206796RBEEA-Vishay-datasheet-10854096.pdf; ComponentLink17Description: https://datasheet.octopart.com/TNPW1206796RBEEA-Vishay-datasheet-10854096.pdf; ComponentLink18URL: https://datasheet.octopart.com/TNPW1206796RBEEA-Vishay-datasheet-10678752.pdf; ComponentLink18Description: https://datasheet.octopart.com/TNPW1206796RBEEA-Vishay-datasheet-10678752.pdf; ComponentLink19URL: https://datasheet.octopart.com/TNPW1206796RBEEA-Vishay-datasheet-10283461.pdf; ComponentLink19Description: https://datasheet.octopart.com/TNPW1206796RBEEA-Vishay-datasheet-10283461.pdf; ComponentLink20URL: https://datasheet.octopart.com/TNPW1206796RBEEA-Vishay-datasheet-10185418.pdf; ComponentLink20Description: https://datasheet.octopart.com/TNPW1206796RBEEA-Vishay-datasheet-10185418.pdf; ComponentLink21URL: https://datasheet.octopart.com/TNPW1206796RBEEA-Vishay-datasheet-10055244.pdf; ComponentLink21Description: https://datasheet.octopart.com/TNPW1206796RBEEA-Vishay-datasheet-10055244.pdf; ComponentLink22URL: http://sigma.octopart.com:80/rohs_statement/Vishay-company-15.pdf?src-supplier=Compliance+Statements; ComponentLink22Description: http://sigma.octopart.com:80/rohs_statement/Vishay-company-15.pdf?src-supplier=Compliance+Statements
footprint Res-1206
pins: 1, 2

## TR0603B499KP0525Z
designator R?, comment 499K
100mW Thin Film Resistor 75V ±25ppm/℃ ±0.1% 499kΩ 0603 Chip Resistor - Surface Mount ROHS; Manufacturer: Ever Ohms; Manufacturer Part Number: TR0603B499KP0525Z; Supplier: LCSC; LCSC Part Number: C149937; RoHS: No; Item Type: Resistor
footprint Res-0603
pins: 1, 2

## V300LT20AP
designator VR?
775V 405V 300V 470V Plugin Varistors ROHS; Manufacturer: Littelfuse; Manufacturer Part Number: V300LT20AP; Supplier: Digikey; LCSC Part Number: C179067; RoHS: Yes; Item Type: Varistors; Stock: 3169; Pricing: 1=0.45, 10=0.398, 25=0.3736, 100=0.3048 (USD); ComponentLink1URL: https://datasheet.ciiva.com/4541/littelfuse-mov-la-34212-4541978.pdf?src-supplier=Mouser; ComponentLink1Description: https://datasheet.ciiva.com/4541/littelfuse-mov-la-34212-4541978.pdf?src-supplier=Mouser; ComponentLink2URL: https://datasheet.ciiva.com/367/littelfuse-mov-la-367663.pdf?src-supplier=Digikey; ComponentLink2Description: https://datasheet.ciiva.com/367/littelfuse-mov-la-367663.pdf?src-supplier=Digikey
footprint V300LT20AP
pins: 1, 2

## VDR-05D471K
designator VR?
810V 385V 300V 423V~517V Plugin Varistors ROHS; Manufacturer: VDR Varistor; Manufacturer Part Number: VDR-05D471K; Package: Plugin; LCSC Part Number: C273543; Item Type: Varistors; ComponentLink1Description: LCSC; ComponentLink1URL: https://www.lcsc.com/product-detail/Varistors_VDR-span-style-background-color-ff0-Varistor-span-VDR-05D471K_C273543.html
footprint VDR-05D471K
pins: 1, 2

## Vertical Resistor
designator R?, comment 10R
Metal Oxide Resistors 10Ω 2W ±350ppm/℃ ±5% Plugin Through Hole Resistors ROHS; Manufacturer: VO; Manufacturer Part Number: MO2WS-10Ω±5%-6T63; Package: Plugin; LCSC Part Number: C601001; Item Type: Through Hole Resistor; ComponentLink1Description: LCSC; ComponentLink1URL: https://www.lcsc.com/product-detail/Through-Hole-Resistors_VO-MO2WS-10-5-6T63_C601001.html
footprint MO2WS Vertical Type
pins: 1, 2

## VG039NCHXTB203
designator R?, comment 20K
±25% 20kΩ SMD Variable Resistors/Potentiometers ROHS; Manufacturer: HDK(Hokuriku Elec Industry); Manufacturer Part Number: VG039NCHXTB203; Package: SMD; LCSC Part Number: C128550; Item Type: Potentiometer; ComponentLink1Description: LCSC; ComponentLink1URL: https://www.lcsc.com/product-detail/Variable-Resistors-Potentiometers_HDK-Hokuriku-Elec-Industry-VG039NCHXTB203_C128550.html
footprint VG039NCHXTB203
pins: 1, 2, 3

## VG039NCHXTB222
designator R?, comment 2.2K
2.2kΩ SMD Variable Resistors/Potentiometers ROHS; Manufacturer: HDK; Manufacturer Part Number: VG039NCHXTB222; ComponentLink1Description: LCSC; ComponentLink1URL: https://lcsc.com/product-detail/Variable-Resistors-Potentiometers_HDK-Hokuriku-Elec-Industry-VG039NCHXTB222_C145162.html; Package: SMD; LCSC Part Number: C145162; Item Type: Resistor
footprint VG039NCHXTB222_
pins: 1, 2, 3

## VG039NCHXTB504
designator R?, comment 500k
±25% 500kΩ SMD Variable Resistors/Potentiometers ROHS; Manufacturer: HDK; Manufacturer Part Number: VG039NCHXTB504; LCSC Part Number: C128558; Item Type: Potentiometer; ComponentLink1Description: LCSC; ComponentLink1URL: https://www.lcsc.com/product-detail/Variable-Resistors-Potentiometers_HDK-Hokuriku-Elec-Industry-VG039NCHXTB504_C128558.html; Value: 500k
footprint VG039NCHXTB504_
pins: 1 CCW, 2 Wiper, 3 CW

## WF04H1004DTL
designator R?, comment 1M
125mW ±100ppm/℃ ±0.5% 1MΩ 0402 Chip Resistor - Surface Mount ROHS; Manufacturer Part Number: WF04H1004DTL; Manuacturer: Walsin Tech Crop; Package: 0402; Value: 1M; LCSC Part Number: C305257; ComponentLink1Description: LCSC; ComponentLink1URL: https://www.lcsc.com/product-detail/Chip-Resistor-Surface-Mount_Walsin-Tech-Corp-WF04H1004DTL_C305257.html
footprint Res-0402
pins: 1, 2

## WR02X821JAL
designator R?, comment 820R
50mW Thick Film Resistors ±200ppm/℃ ±5% 820Ω 0201 Chip Resistor - Surface Mount ROHS; Manufacturer: Walsin Tech Corp; Manufacturer Part Number: WR02X821JAL; Package: 0201; LCSC Part Number: C180347; Item Type: Resistor; ComponentLink1Description: LCSC; ComponentLink1URL: https://www.lcsc.com/product-detail/Chip-Resistor-Surface-Mount_Walsin-Tech-Corp-WR02X821JAL_C180347.html
footprint Res-0201
pins: 1, 2

## WR25X223JTL
designator R?, comment 22K
1W 250V ±100ppm/℃ ±5% 22kΩ 2512 Chip Resistor - Surface Mount ROHS; Manufacturer: Walsin Tech Corp; Manufacturer Part Number: WR25X223JTL; Package: 2512; LCSC Part Number: C396242; Item Type: Resistor; ComponentLink1Description: LCSC; ComponentLink1URL: https://www.lcsc.com/product-detail/Chip-Resistor-Surface-Mount_Walsin-Tech-Corp-WR25X223JTL_C396242.html
footprint RES-2512
pins: 1, 2

## WSL2512R0250FEA
designator R?, comment 0.025R
RES 0.025 OHM 1% 1W 2512; Manufacturer: Vishay Dale; Manufacturer Part Number: WSL2512R0250FEA; Item Type: Resistor; Value: 25mR; Voltage Rating: 150mV; Temperature Coefficient: 75ppm/°C; Supplier: Mouser; Supplier Part Number: 71-WSL2512R0250FEA; RoHS: No; Stock: 279245; Pricing: 1=0.58, 10=0.371, 50=0.371, 100=0.289, 1000=0.267, 10000=0.267 (USD); Case/Package: 2512; Pins: 2; Weight: 0.002243oz; Case Code (Imperial): 2512; Case Code (Metric): 6432; Contact Plating: Tin,Matte; Min Operating Temperature: -65°C; Max Operating Temperature: 170°C; Tolerance: 1%; Power Rating: 1W; Packaging: Tape and Reel; Package Quantity: 2000; Termination: SMD/SMT; Resistor Type: Metal Strip; Features: Moisture Resistant,Automotive AEC-Q200,Anti-Sulfur; Series: WSL; Max Power Dissipation: 1W; Number of Terminations: 2; Resistance Tolerance: 1%; Technology: METAL STRIP; Length: 6.4mm; Width: 3.2mm; Height: 0.635mm; Depth: 3.18mm; Radiation Hardening: No; Reach SVHC Compliant: No; Lead Free: Lead Free; RoHS Compliant: No; ComponentLink1URL: https://datasheet.ciiva.com/11811/0900766b80d81e3e-11811295.pdf?src-supplier=Rs; ComponentLink1Description: https://datasheet.ciiva.com/11811/0900766b80d81e3e-11811295.pdf?src-supplier=Rs; ComponentLink2URL: https://datasheet.ciiva.com/6088/wsl-6088905.pdf?src-supplier=Farnell; ComponentLink2Description: https://datasheet.ciiva.com/6088/wsl-6088905.pdf?src-supplier=Farnell; ComponentLink3URL: https://datasheet.ciiva.com/9024/wsl-9024744.pdf?src-supplier=Avnet; ComponentLink3Description: https://datasheet.ciiva.com/9024/wsl-9024744.pdf?src-supplier=Avnet; ComponentLink4URL: https://datasheet.ciiva.com/22675/wsl-22675150.pdf?src-supplier=Element14; ComponentLink4Description: https://datasheet.ciiva.com/22675/wsl-22675150.pdf?src-supplier=Element14; ComponentLink5URL: https://datasheet.ciiva.com/16768/70201098-16768106.pdf?src-supplier=Allied+Electronics; ComponentLink5Description: https://datasheet.ciiva.com/16768/70201098-16768106.pdf?src-supplier=Allied+Electronics; ComponentLink6URL: https://datasheet.ciiva.com/7702/442550-7702460.pdf?src-supplier=Element14; ComponentLink6Description: https://datasheet.ciiva.com/7702/442550-7702460.pdf?src-supplier=Element14; ComponentLink7URL: https://datasheet.ciiva.com/7702/442550-7702461.pdf?src-supplier=Element14; ComponentLink7Description: https://datasheet.ciiva.com/7702/442550-7702461.pdf?src-supplier=Element14; ComponentLink8URL: https://datasheet.ciiva.com/9024/wsl-9024767.pdf?src-supplier=Avnet; ComponentLink8Description: https://datasheet.ciiva.com/9024/wsl-9024767.pdf?src-supplier=Avnet
footprint RES-2512
pins: 1, 2

## WSLP1206R0150FEA
designator R?, comment 15mR
RES 0.015 OHM 1% 1W 1206; Manufacturer: Vishay Dale; Manufacturer Part Number: WSLP1206R0150FEA; Item Type: Resistor; Supplier: Mouser; LCSC Part Number: C844911; RoHS: Yes; Stock: 4766; Pricing: 1=0.68, 10=0.436, 50=0.436, 100=0.339, 1000=0.222, 10000=0.191 (USD); Lead Free: 5697LeadFree; ComponentLink1URL: https://datasheet.ciiva.com/2503/wslp-2503933.pdf?src-supplier=Digikey; ComponentLink1Description: https://datasheet.ciiva.com/2503/wslp-2503933.pdf?src-supplier=Digikey; ComponentLink2URL: https://datasheet.ciiva.com/2503/wslp-2503935.pdf?src-supplier=Digikey; ComponentLink2Description: https://datasheet.ciiva.com/2503/wslp-2503935.pdf?src-supplier=Digikey; ComponentLink3URL: https://datasheet.ciiva.com/2503/wslp-2503934.pdf?src-supplier=Digikey; ComponentLink3Description: https://datasheet.ciiva.com/2503/wslp-2503934.pdf?src-supplier=Digikey
footprint Res-1206
pins: 1, 2

## WSLP59311L500FEB
designator R?, comment 1.5mR
RES 0.0015 OHM 1% 10W 5931; Manufacturer: Vishay Dale; Manufacturer Part Number: WSLP59311L500FEB; Item Type: Resistors; Max Power Dissipation: 7W; Temperature Coefficient: 75ppm/°C; Supplier: Digikey; LCSC Part Number: C4057265; RoHS: Yes; Pricing: 1000=1.15544 (USD); Case/Package: 5931; Min Operating Temperature: -65°C; Max Operating Temperature: 170°C; Package Quantity: 1000; Packaging: Tape and Reel; Value: 1.5mR; Number of Terminations: 2; Tolerance: 1%; Features: Moisture Resistant; Series: WSLP; Length: 0.591inch; Width: 0.305inch; Height: 0.02inch; ComponentLink1URL: http://www.vishay.com/docs/30176/wslp3921.pdf?src-supplier=Digikey; ComponentLink1Description: http://www.vishay.com/docs/30176/wslp3921.pdf?src-supplier=Digikey
footprint 5931
pins: 1, 2

## YC164-FR-0710KL
designator RN?, comment 10K
RES ARRAY 4 RES 10K OHM 1206; Manufacturer: Yageo; Manufacturer Part Number: YC164-FR-0710KL; Tolerance: 1%; Voltage Rating: 50V; Number of Elements: 4; Value: 10kR; Circuit Type: Isolated; Power Per Element: 62.5mW; Temperature Coefficient: 200ppm/°C; Item Type: Resistor Array; Supplier 1: Future Electronics; RoHS: Yes; Category: Resistor Arrays; Stock 1: 25000; Pricing 1: 5000=0.0101, 20000=0.0095, 50000=0.0092, 125000=0.0089, 200000=0.0085 (USD); Mounting Technology: Surface Mount; Pins: 8; Case Code (Metric): 3216; Case Code (Imperial): 1206; Min Operating Temperature: -55°C; Max Operating Temperature: 155°C; Packaging: Tape and Reel; Number of Resistors: 4; Number of Circuits: 4; Series: YC164; Resistance Tolerance: 1%; Length: 0.126inch; Width: 0.063inch; Height: 0.028inch; Lead Free: Lead Free; RoHS Compliant: Yes; Reach SVHC Compliant: Unknown; ComponentLink1URL: http://www.farnell.com/datasheets/2167431.pdf?src-supplier=Farnell; ComponentLink1Description: http://www.farnell.com/datasheets/2167431.pdf?src-supplier=Farnell; ComponentLink2URL: https://media.digikey.com/pdf/Data%20Sheets/Yageo%20PDFs/YC102-358,TC122-164_Series_DS.pdf?src-supplier=Digi-Key; ComponentLink2Description: https://media.digikey.com/pdf/Data%20Sheets/Yageo%20PDFs/YC102-358,TC122-164_Series_DS.pdf?src-supplier=Digi-Key; ComponentLink3URL: http://www.farnell.com/datasheets/2167431.pdf?src-supplier=Element14; ComponentLink3Description: http://www.farnell.com/datasheets/2167431.pdf?src-supplier=Element14; ComponentLink4URL: http://www.farnell.com/datasheets/443424.pdf?src-supplier=Element14; ComponentLink4Description: http://www.farnell.com/datasheets/443424.pdf?src-supplier=Element14; ComponentLink5URL: http://www.farnell.com/datasheets/2167431.pdf?src-supplier=Newark; ComponentLink5Description: http://www.farnell.com/datasheets/2167431.pdf?src-supplier=Newark; Supplier Part Number 1: 5054288; LCSC Part Number: C110924
footprint YC164-FR-0710KL
pins: 1, 2, 3, 4, 5, 6, 7, 8

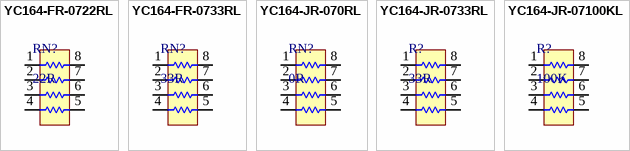
[diagram p27: symbols YC164-FR-0722RL to YC164-JR-07100KL]

## YC164-FR-0722RL
designator RN?, comment 22R
RES ARRAY 4 RES 22 OHM 1206; Manufacturer: YAGEO; Manufacturer Part Number: YC164-FR-0722RL; Item Type: Resistor; Package: 0604x4; LCSC Part Number: C728877; ComponentLink1Description: LCSC; ComponentLink1URL: https://www.lcsc.com/product-detail/Resistor-Networks-Arrays_YAGEO-YC164-FR-0722RL_C728877.html
footprint 0603x4
pins: 1, 2, 3, 4, 5, 6, 7, 8